# Altium footprint library ubloxLib.PcbLib: 65 footprints (part 1 of 5)
Each footprint in its own frame and in the unit in brackets; x right, y up, seen from the top. Pads: shape width x height; smd on the part's side, far side on the other; paste and mask are expansions set on the pad; w line width, h text height; cw(c..) or ccw(c..) is an arc to the next point about the centre after c.
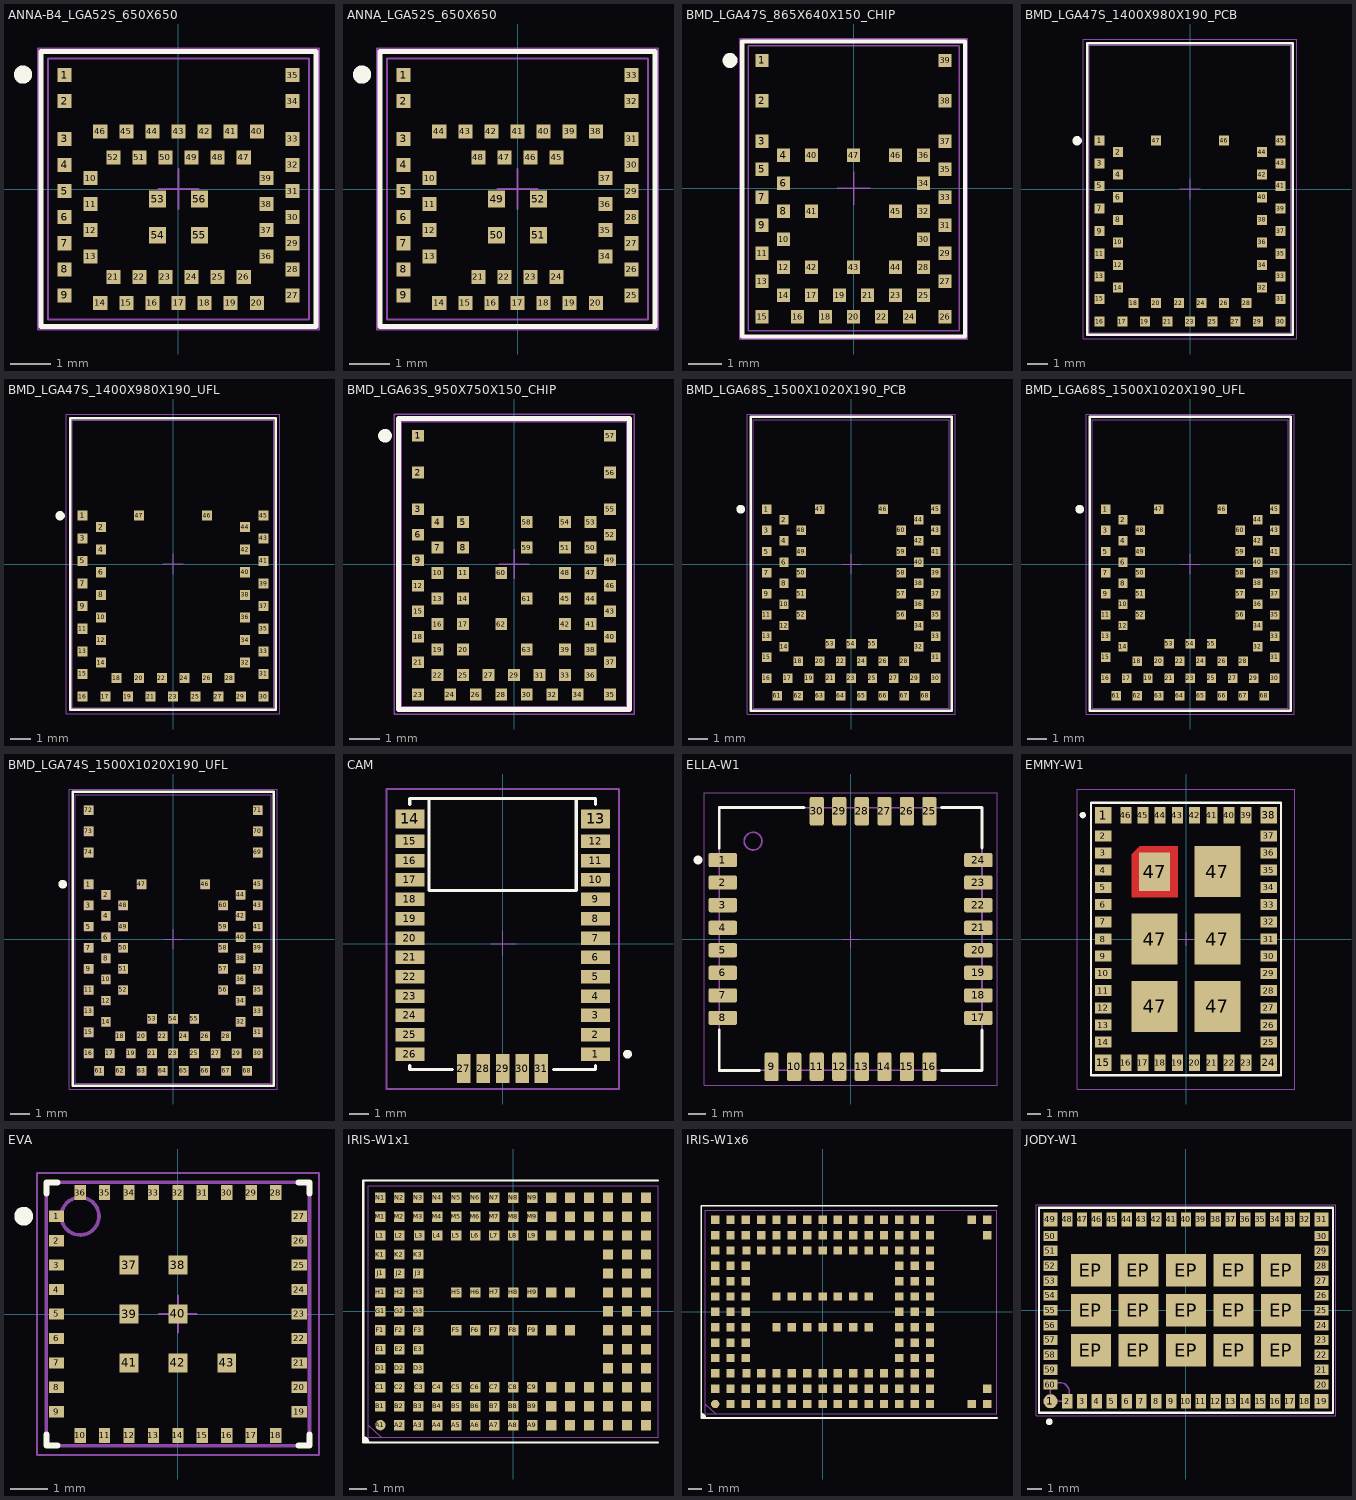
[diagram p0: the footprints below, top view; thin cyan lines are the x and y axes]

## ANNA-B4_LGA52S_650X650 [mm]
pads (56):
  rect 0.35x0.35 smd paste+0 mask+0.05: 1(-2.839,2.841) 2(-2.839,2.191) 3(-2.839,1.249) 4(-2.839,0.599) 5(-2.839,-0.051) 6(-2.839,-0.701) 7(-2.839,-1.351) 8(-2.839,-2.001) 9(-2.839,-2.651) 10(-2.189,0.274) 11(-2.189,-0.376) 12(-2.189,-1.026) 13(-2.189,-1.676) 14(-1.949,-2.839) 15(-1.299,-2.839) 17(0.001,-2.839) 18(0.651,-2.839) 20(1.951,-2.839) 21(-1.624,-2.189) 22(-0.974,-2.189) 24(0.326,-2.189) 25(0.976,-2.189) 26(1.626,-2.189) 27(2.841,-2.651) 28(2.841,-2.001) 29(2.841,-1.351) 30(2.841,-0.701) 31(2.841,-0.051) 32(2.841,0.599) 33(2.841,1.249) 34(2.841,2.191) 35(2.841,2.841) 36(2.191,-1.676) 37(2.191,-1.026) 38(2.191,-0.376) 39(2.191,0.274) 40(1.951,1.436) 41(1.301,1.436) 42(0.651,1.436) 43(0.001,1.436) 44(-0.649,1.436) 45(-1.299,1.436) 46(-1.949,1.436) 47(1.626,0.786) 49(0.326,0.786) 51(-0.974,0.786) 52(-1.624,0.786)
  rect 0.35x0.35 smd mask+0.05: 16(-0.649,-2.839) 19(1.301,-2.839) 23(-0.324,-2.189) 48(0.976,0.786) 50(-0.324,0.786)
  rect 0.42x0.42 smd paste+0 mask+0.05: 53(-0.519,-0.251) 54(-0.519,-1.151) 55(0.521,-1.151) 56(0.521,-0.251)
Top Overlay:
  circle w0.254: c-3.874,2.851 r0.1
  lines w0.127: -3.424,-3.424 -3.424,3.426 3.426,3.426 3.426,-3.424 -2.824,-3.424 -3.424,-3.424
Mechanical 13:
  lines w0.05: -3.249,-3.249 3.251,-3.249 3.251,3.251 -3.249,3.251 -3.249,-3.249
Mechanical 15:
  lines w0.05: -0.499,0.001 0.501,0.001 ; 0.001,-0.499 0.001,0.501 ; -3.499,-3.499 -3.499,3.501 3.501,3.501 3.501,-3.499 -3.499,-3.499
  text ".Designator" at 0.101,0.434 h1
3D body "ANNA-B4.step": height 1.15, standoff 0, extent -3.249,-3.249 3.251,3.251

## ANNA_LGA52S_650X650 [mm]
pads (52):
  rect 0.35x0.35 smd paste+0 mask+0.05: 1(-2.84,2.84) 2(-2.84,2.19) 3(-2.84,1.248) 4(-2.84,0.598) 5(-2.84,-0.052) 6(-2.84,-0.702) 7(-2.84,-1.352) 8(-2.84,-2.002) 9(-2.84,-2.652) 10(-2.19,0.273) 11(-2.19,-0.377) 12(-2.19,-1.027) 13(-2.19,-1.677) 14(-1.95,-2.84) 15(-1.3,-2.84) 17(0,-2.84) 18(0.65,-2.84) 20(1.95,-2.84) 21(-0.975,-2.19) 23(0.325,-2.19) 24(0.975,-2.19) 25(2.84,-2.652) 26(2.84,-2.002) 27(2.84,-1.352) 28(2.84,-0.702) 29(2.84,-0.052) 30(2.84,0.598) 31(2.84,1.248) 32(2.84,2.19) 33(2.84,2.84) 34(2.19,-1.677) 35(2.19,-1.027) 36(2.19,-0.377) 37(2.19,0.273) 38(1.95,1.435) 39(1.3,1.435) 40(0.65,1.435) 41(0,1.435) 42(-0.65,1.435) 43(-1.3,1.435) 44(-1.95,1.435) 46(0.325,0.785) 48(-0.975,0.785)
  rect 0.35x0.35 smd mask+0.05: 16(-0.65,-2.84) 19(1.3,-2.84) 22(-0.325,-2.19) 45(0.975,0.785) 47(-0.325,0.785)
  rect 0.42x0.42 smd paste+0 mask+0.05: 49(-0.52,-0.252) 50(-0.52,-1.152) 51(0.52,-1.152) 52(0.52,-0.252)
Top Overlay:
  circle w0.254: c-3.875,2.85 r0.1
  lines w0.127: -3.425,-3.425 -2.825,-3.425 3.425,-3.425 3.425,3.425 -3.425,3.425 -3.425,-3.425
Mechanical 13:
  lines w0.05: -3.25,-3.25 -3.25,3.25 3.25,3.25 3.25,-3.25 -3.25,-3.25
Mechanical 15:
  lines w0.05: -0.5,0 0.5,0 ; 0,-0.5 0,0.5 ; -3.5,-3.5 3.5,-3.5 3.5,3.5 -3.5,3.5 -3.5,-3.5
  text ".Designator" at 0.1,0.433 h1
3D body "u-blox_ANNA-B1-LGA52 (STEP-AP214)_1.0.step": height 1.2, standoff 0.05, extent -3.25,-3.25 3.25,3.25

## BMD_LGA47S_865X640X150_CHIP [mm] "LGA, 47pin, 0.8mm Pitch, 8.65mm x 6.4mm"
height 1.5
pads (47):
  rect 0.4x0.4 smd: 1(-2.775,3.875) 2(-2.775,2.65) 3(-2.775,1.425) 4(-2.125,1) 5(-2.775,0.575) 6(-2.125,0.15) 7(-2.775,-0.275) 8(-2.125,-0.7) 9(-2.775,-1.125) 10(-2.125,-1.55) 11(-2.775,-1.975) 12(-2.125,-2.4) 13(-2.775,-2.825) 14(-2.125,-3.25) 15(-2.775,-3.9) 16(-1.7,-3.9) 17(-1.275,-3.25) 18(-0.85,-3.9) 19(-0.425,-3.25) 20(0,-3.9) 21(0.425,-3.25) 22(0.85,-3.9) 23(1.275,-3.25) 24(1.7,-3.9) 25(2.125,-3.25) 26(2.775,-3.9) 27(2.775,-2.825) 28(2.125,-2.4) 29(2.775,-1.975) 30(2.125,-1.55) 31(2.775,-1.125) 32(2.125,-0.7) 33(2.775,-0.275) 34(2.125,0.15) 35(2.775,0.575) 36(2.125,1) 37(2.775,1.425) 38(2.775,2.65) 39(2.775,3.875) 40(-1.275,1) 41(-1.275,-0.7) 42(-1.275,-2.4) 43(0,-2.4) 44(1.275,-2.4) 45(1.275,-0.7) 46(1.275,1) 47(0,1)
Top Overlay:
  circle w0.254: c-3.75,3.875 r0.1
  lines w0.127: -3.375,-4.5 3.375,-4.5 3.375,4.45 -3.375,4.45 -3.375,-4.5
Mechanical 13:
  lines w0.05: -3.2,-4.325 3.2,-4.325 3.2,4.325 -3.2,4.325 -3.2,-4.325
Mechanical 15:
  lines w0.05: -0.5,0 0.5,0 ; 0,-0.5 0,0.5 ; -3.45,-4.575 3.45,-4.575 3.45,4.525 -3.45,4.525 -3.45,-4.575
  text ".Designator" at 0.1,0.433 h1
Multi-Layer:
  pour cut-out: -3.2,4.325 -3.2,4.075 -2.575,4.075 -2.575,1.2 2.425,1.2 2.425,4.075 3.2,4.075 3.2,4.325
3D body "BMD-350.STEP": height 1.54, standoff 0.05, extent -3.2,-4.325 3.2,4.325

## BMD_LGA47S_1400X980X190_PCB [mm] "LGA, 47pin, 1.1mm Pitch, 14mm x 9.8mm"
height 1.9
pads (47):
  rect 0.49x0.49 smd: 1(-4.4,2.35) 2(-3.5,1.8) 3(-4.4,1.25) 4(-3.5,0.7) 5(-4.4,0.15) 6(-3.5,-0.4) 7(-4.4,-0.95) 8(-3.5,-1.5) 9(-4.4,-2.05) 10(-3.5,-2.6) 11(-4.4,-3.15) 12(-3.5,-3.7) 13(-4.4,-4.25) 14(-3.5,-4.8) 15(-4.4,-5.35) 16(-4.4,-6.45) 17(-3.3,-6.45) 18(-2.75,-5.55) 19(-2.2,-6.45) 20(-1.65,-5.55) 21(-1.1,-6.45) 22(-0.55,-5.55) 23(0,-6.45) 24(0.55,-5.55) 25(1.1,-6.45) 26(1.65,-5.55) 27(2.2,-6.45) 28(2.75,-5.55) 29(3.3,-6.45) 30(4.4,-6.45) 31(4.4,-5.35) 32(3.5,-4.8) 33(4.4,-4.25) 34(3.5,-3.7) 35(4.4,-3.15) 36(3.5,-2.6) 37(4.4,-2.05) 38(3.5,-1.5) 39(4.4,-0.95) 40(3.5,-0.4) 41(4.4,0.15) 42(3.5,0.7) 43(4.4,1.25) 44(3.5,1.8) 45(4.4,2.35) 46(1.65,2.35) 47(-1.65,2.35)
Top Overlay:
  circle w0.254: c-5.5,2.35 r0.1
  lines w0.127: -5,-7.1 -5,7.1 5,7.1 5,-7.1 -5,-7.1
Mechanical 13:
  lines w0.05: -4.9,-7 -4.9,7 4.9,7 4.9,-7 -4.9,-7
Mechanical 15:
  lines w0.05: -0.5,0 0.5,0 ; 0,-0.5 0,0.5 ; -5.2,-7.3 -5.2,7.3 5.2,7.3 5.2,-7.3 -5.2,-7.3
  text ".Designator" at 0.1,0.433 h1
Multi-Layer:
  pour cut-out: -4.9,2.6 4.9,2.6 4.9,7 -4.9,7
3D body "BMD-300-330-360.STEP": height 1.86, standoff 0.05, extent -4.9,-7 4.9,7

## BMD_LGA47S_1400X980X190_UFL [mm] "LGA, 47pin, 1.1mm Pitch, 14mm x 9.8mm"
height 1.9
pads (47):
  rect 0.49x0.49 smd: 1(-4.4,2.35) 2(-3.5,1.8) 3(-4.4,1.25) 4(-3.5,0.7) 5(-4.4,0.15) 6(-3.5,-0.4) 7(-4.4,-0.95) 8(-3.5,-1.5) 9(-4.4,-2.05) 10(-3.5,-2.6) 11(-4.4,-3.15) 12(-3.5,-3.7) 13(-4.4,-4.25) 14(-3.5,-4.8) 15(-4.4,-5.35) 16(-4.4,-6.45) 17(-3.3,-6.45) 18(-2.75,-5.55) 19(-2.2,-6.45) 20(-1.65,-5.55) 21(-1.1,-6.45) 22(-0.55,-5.55) 23(0,-6.45) 24(0.55,-5.55) 25(1.1,-6.45) 26(1.65,-5.55) 27(2.2,-6.45) 28(2.75,-5.55) 29(3.3,-6.45) 30(4.4,-6.45) 31(4.4,-5.35) 32(3.5,-4.8) 33(4.4,-4.25) 34(3.5,-3.7) 35(4.4,-3.15) 36(3.5,-2.6) 37(4.4,-2.05) 38(3.5,-1.5) 39(4.4,-0.95) 40(3.5,-0.4) 41(4.4,0.15) 42(3.5,0.7) 43(4.4,1.25) 44(3.5,1.8) 45(4.4,2.35) 46(1.65,2.35) 47(-1.65,2.35)
Top Overlay:
  circle w0.254: c-5.5,2.35 r0.1
  lines w0.127: -5,-7.1 5,-7.1 5,7.1 -5,7.1 -5,-7.1
Mechanical 13:
  lines w0.05: -4.9,-7 4.9,-7 4.9,7 -4.9,7 -4.9,-7
Mechanical 15:
  lines w0.05: -0.5,0 0.5,0 ; 0,-0.5 0,0.5 ; -5.2,-7.3 5.2,-7.3 5.2,7.3 -5.2,7.3 -5.2,-7.3
  text ".Designator" at 0.1,0.433 h1
Multi-Layer:
  pour cut-out: -4.9,2.6 4.9,2.6 4.9,7 -4.9,7
3D body "BMD-301.STEP": height 1.89, standoff 0.05, extent -4.9,-7 4.9,7

## BMD_LGA63S_950X750X150_CHIP [mm] "WLCSP, 63pin, 0.85mm Pitch, 9.5mm x 7.5mm"
height 1.5
pads (63):
  rect 0.39x0.39 smd: 1(-3.2,4.275) 2(-3.2,3.05) 3(-3.2,1.825) 4(-2.55,1.4) 5(-1.7,1.4) 6(-3.2,0.975) 7(-2.55,0.55) 8(-1.7,0.55) 9(-3.2,0.125) 10(-2.55,-0.3) 11(-1.7,-0.3) 12(-3.2,-0.725) 13(-2.55,-1.15) 14(-1.7,-1.15) 15(-3.2,-1.575) 16(-2.55,-2) 17(-1.7,-2) 18(-3.2,-2.425) 19(-2.55,-2.85) 20(-1.7,-2.85) 21(-3.2,-3.275) 22(-2.55,-3.7) 23(-3.2,-4.35) 24(-2.125,-4.35) 25(-1.7,-3.7) 26(-1.275,-4.35) 27(-0.85,-3.7) 28(-0.425,-4.35) 29(0,-3.7) 30(0.425,-4.35) 31(0.85,-3.7) 32(1.275,-4.35) 33(1.7,-3.7) 34(2.125,-4.35) 35(3.2,-4.35) 36(2.55,-3.7) 37(3.2,-3.275) 38(2.55,-2.85) 39(1.7,-2.85) 40(3.2,-2.425) 41(2.55,-2) 42(1.7,-2) 43(3.2,-1.575) 44(2.55,-1.15) 45(1.7,-1.15) 46(3.2,-0.725) 47(2.55,-0.3) 48(1.7,-0.3) 49(3.2,0.125) 50(2.55,0.55) 51(1.7,0.55) 52(3.2,0.975) 53(2.55,1.4) 54(1.7,1.4) 55(3.2,1.825) 56(3.2,3.05) 57(3.2,4.275) 58(0.425,1.4) 59(0.425,0.55) 60(-0.425,-0.3) 61(0.425,-1.15) 62(-0.425,-2) 63(0.425,-2.85)
Top Overlay:
  circle w0.254: c-4.3,4.275 r0.1
  lines w0.152: -3.85,-4.85 3.85,-4.85 3.85,4.85 -3.85,4.85 -3.85,-4.85
Mechanical 13:
  lines w0.05: -3.75,-4.75 -3.75,4.75 3.75,4.75 3.75,-4.75 -3.75,-4.75
Mechanical 15:
  lines w0.05: -0.5,0 0.5,0 ; 0,-0.5 0,0.5 ; -4,-5 -4,5 4,5 4,-5 -4,-5
  text ".Designator" at 0.1,0.433 h1
Multi-Layer:
  pour cut-out: -3.75,4.75 -3.75,4.55 -2.36,4.55 -2.36,1.65 2.79,1.65 2.79,4.55 3.75,4.55 3.75,4.75
3D body "BMD-380.STEP": height 1.53, standoff 0.05, extent -3.75,-4.75 3.75,4.75

## BMD_LGA68S_1500X1020X190_PCB [mm] "LGA, 68pin, 1.1mm Pitch, 15mm x 10.2mm"
height 1.9
pads (68):
  rect 0.49x0.49 smd: 1(-4.4,2.85) 2(-3.5,2.3) 3(-4.4,1.75) 4(-3.5,1.2) 5(-4.4,0.65) 6(-3.5,0.1) 7(-4.4,-0.45) 8(-3.5,-1) 9(-4.4,-1.55) 10(-3.5,-2.1) 11(-4.4,-2.65) 12(-3.5,-3.2) 13(-4.4,-3.75) 14(-3.5,-4.3) 15(-4.4,-4.85) 16(-4.4,-5.95) 17(-3.3,-5.95) 18(-2.75,-5.05) 19(-2.2,-5.95) 20(-1.65,-5.05) 21(-1.1,-5.95) 22(-0.55,-5.05) 23(0,-5.95) 24(0.55,-5.05) 25(1.1,-5.95) 26(1.65,-5.05) 27(2.2,-5.95) 28(2.75,-5.05) 29(3.3,-5.95) 30(4.4,-5.95) 31(4.4,-4.85) 32(3.5,-4.3) 33(4.4,-3.75) 34(3.5,-3.2) 35(4.4,-2.65) 36(3.5,-2.1) 37(4.4,-1.55) 38(3.5,-1) 39(4.4,-0.45) 40(3.5,0.1) 41(4.4,0.65) 42(3.5,1.2) 43(4.4,1.75) 44(3.5,2.3) 45(4.4,2.85) 46(1.65,2.85) 47(-1.65,2.85) 48(-2.6,1.75) 49(-2.6,0.65) 50(-2.6,-0.45) 51(-2.6,-1.55) 52(-2.6,-2.65) 53(-1.1,-4.15) 54(0,-4.15) 55(1.1,-4.15) 56(2.6,-2.65) 57(2.6,-1.55) 58(2.6,-0.45) 59(2.6,0.65) 60(2.6,1.75) 61(-3.85,-6.85) 62(-2.75,-6.85) 63(-1.65,-6.85) 64(-0.55,-6.85) 65(0.55,-6.85) 66(1.65,-6.85) 67(2.75,-6.85) 68(3.85,-6.85)
Top Overlay:
  circle w0.254: c-5.75,2.85 r0.1
  lines w0.127: -5.225,-7.625 5.225,-7.625 5.225,7.65 -5.225,7.65 -5.225,-7.625
Mechanical 13:
  lines w0.05: -5.1,-7.5 5.1,-7.5 5.1,7.5 -5.1,7.5 -5.1,-7.5
Mechanical 15:
  lines w0.05: -0.5,0 0.5,0 ; 0,-0.5 0,0.5 ; -5.4,-7.8 -5.4,7.8 5.4,7.8 5.4,-7.8 -5.4,-7.8
  text ".Designator" at 0.1,0.433 h1
Multi-Layer:
  pour cut-out: -5.1,3.1 5.1,3.1 5.1,7.5 -5.1,7.5
3D body "BMD-340.STEP": height 1.87, standoff 0.05, extent -5.1,-7.5 5.1,7.5

## BMD_LGA68S_1500X1020X190_UFL [mm] "LGA, 68pin, 1.1mm Pitch, 15mm x 10.2mm"
height 1.9
pads (68):
  rect 0.49x0.49 smd: 1(-4.4,2.85) 2(-3.5,2.3) 3(-4.4,1.75) 4(-3.5,1.2) 5(-4.4,0.65) 6(-3.5,0.1) 7(-4.4,-0.45) 8(-3.5,-1) 9(-4.4,-1.55) 10(-3.5,-2.1) 11(-4.4,-2.65) 12(-3.5,-3.2) 13(-4.4,-3.75) 14(-3.5,-4.3) 15(-4.4,-4.85) 16(-4.4,-5.95) 17(-3.3,-5.95) 18(-2.75,-5.05) 19(-2.2,-5.95) 20(-1.65,-5.05) 21(-1.1,-5.95) 22(-0.55,-5.05) 23(0,-5.95) 24(0.55,-5.05) 25(1.1,-5.95) 26(1.65,-5.05) 27(2.2,-5.95) 28(2.75,-5.05) 29(3.3,-5.95) 30(4.4,-5.95) 31(4.4,-4.85) 32(3.5,-4.3) 33(4.4,-3.75) 34(3.5,-3.2) 35(4.4,-2.65) 36(3.5,-2.1) 37(4.4,-1.55) 38(3.5,-1) 39(4.4,-0.45) 40(3.5,0.1) 41(4.4,0.65) 42(3.5,1.2) 43(4.4,1.75) 44(3.5,2.3) 45(4.4,2.85) 46(1.65,2.85) 47(-1.65,2.85) 48(-2.6,1.75) 49(-2.6,0.65) 50(-2.6,-0.45) 51(-2.6,-1.55) 52(-2.6,-2.65) 53(-1.1,-4.15) 54(0,-4.15) 55(1.1,-4.15) 56(2.6,-2.65) 57(2.6,-1.55) 58(2.6,-0.45) 59(2.6,0.65) 60(2.6,1.75) 61(-3.85,-6.85) 62(-2.75,-6.85) 63(-1.65,-6.85) 64(-0.55,-6.85) 65(0.55,-6.85) 66(1.65,-6.85) 67(2.75,-6.85) 68(3.85,-6.85)
Top Overlay:
  circle w0.254: c-5.75,2.85 r0.1
  lines w0.127: -5.225,-7.625 5.225,-7.625 5.225,7.65 -5.225,7.65 -5.225,-7.625
Mechanical 13:
  lines w0.05: -5.1,-7.5 5.1,-7.5 5.1,7.5 -5.1,7.5 -5.1,-7.5
Mechanical 15:
  lines w0.05: -0.5,0 0.5,0 ; 0,-0.5 0,0.5 ; -5.4,-7.8 -5.4,7.8 5.4,7.8 5.4,-7.8 -5.4,-7.8
  text ".Designator" at 0.1,0.433 h1
Multi-Layer:
  pour cut-out: -5.1,3.1 5.1,3.1 5.1,7.5 -5.1,7.5
3D body "BMD-341.STEP": height 1.87, standoff 0.05, extent -5.1,-7.5 5.1,7.5

## BMD_LGA74S_1500X1020X190_UFL [mm] "LGA, 68pin, 1.1mm Pitch, 15mm x 10.2mm"
height 1.9
pads (74):
  rect 0.49x0.49 smd: 1(-4.4,2.85) 2(-3.5,2.3) 3(-4.4,1.75) 4(-3.5,1.2) 5(-4.4,0.65) 6(-3.5,0.1) 7(-4.4,-0.45) 8(-3.5,-1) 9(-4.4,-1.55) 10(-3.5,-2.1) 11(-4.4,-2.65) 12(-3.5,-3.2) 13(-4.4,-3.75) 14(-3.5,-4.3) 15(-4.4,-4.85) 16(-4.4,-5.95) 17(-3.3,-5.95) 18(-2.75,-5.05) 19(-2.2,-5.95) 20(-1.65,-5.05) 21(-1.1,-5.95) 22(-0.55,-5.05) 23(0,-5.95) 24(0.55,-5.05) 25(1.1,-5.95) 26(1.65,-5.05) 27(2.2,-5.95) 28(2.75,-5.05) 29(3.3,-5.95) 30(4.4,-5.95) 31(4.4,-4.85) 32(3.5,-4.3) 33(4.4,-3.75) 34(3.5,-3.2) 35(4.4,-2.65) 36(3.5,-2.1) 37(4.4,-1.55) 38(3.5,-1) 39(4.4,-0.45) 40(3.5,0.1) 41(4.4,0.65) 42(3.5,1.2) 43(4.4,1.75) 44(3.5,2.3) 45(4.4,2.85) 46(1.65,2.85) 47(-1.65,2.85) 48(-2.6,1.75) 49(-2.6,0.65) 50(-2.6,-0.45) 51(-2.6,-1.55) 52(-2.6,-2.65) 53(-1.1,-4.15) 54(0,-4.15) 55(1.1,-4.15) 56(2.6,-2.65) 57(2.6,-1.55) 58(2.6,-0.45) 59(2.6,0.65) 60(2.6,1.75) 61(-3.85,-6.85) 62(-2.75,-6.85) 63(-1.65,-6.85) 64(-0.55,-6.85) 65(0.55,-6.85) 66(1.65,-6.85) 67(2.75,-6.85) 68(3.85,-6.85)
  rect 0.5x0.5 smd: 69(4.4,4.5) 70(4.4,5.6) 71(4.4,6.7) 72(-4.4,6.7) 73(-4.4,5.6) 74(-4.4,4.5)
Top Overlay:
  circle w0.254: c-5.75,2.85 r0.1
  lines w0.127: -5.225,-7.625 5.225,-7.625 5.225,7.65 -5.225,7.65 -5.225,-7.625
Mechanical 13:
  lines w0.05: -5.1,-7.5 5.1,-7.5 5.1,7.5 -5.1,7.5 -5.1,-7.5
Mechanical 14:
  drawing of 296 lines, arcs and shapes, not listed
Mechanical 15:
  lines w0.05: -0.5,0 0.5,0 ; 0,-0.5 0,0.5 ; -5.4,-7.8 5.4,-7.8 5.4,7.8 -5.4,7.8 -5.4,-7.8
  text ".Designator" at 0.1,0.433 h1
Multi-Layer:
  pour cut-out: -5.1,3.1 5.1,3.1 5.1,7.5 -5.1,7.5
3D body "BMD-345.STEP": height 2.03, standoff 0.05, extent -5.1,-7.5 5.1,7.5

## CAM [mm] "u-blox CAM GNSS antenna module"
pads (31):
  rect 1.5x0.7 smd: 1(4.8,-5.7) 2(4.8,-4.7) 3(4.8,-3.7) 4(4.8,-2.7) 5(4.8,-1.7) 6(4.8,-0.7) 7(4.8,0.3) 8(4.8,1.3) 9(4.8,2.3) 10(4.8,3.3) 11(4.8,4.3) 12(4.8,5.3) 15(-4.8,5.3) 16(-4.8,4.3) 17(-4.8,3.3) 18(-4.8,2.3) 19(-4.8,1.3) 20(-4.8,0.3) 21(-4.8,-0.7) 22(-4.8,-1.7) 23(-4.8,-2.7) 24(-4.8,-3.7) 25(-4.8,-4.7) 26(-4.8,-5.7)
  rect 1.5x1 smd: 13(4.8,6.45) 14(-4.8,6.45)
  rect 0.7x1.5 smd: 27(-2,-6.45) 28(-1,-6.45) 29(0,-6.45) 30(1,-6.45) 31(2,-6.45)
Top Overlay:
  circle w0.254: c6.45,-5.7 r0.1
  lines w0.16: -4.8,-6.3 -4.8,-6.5 -2.6,-6.5 ; -4.8,7.2 -4.8,7.5 4.8,7.5 4.8,7.2 ; -3.8,7.5 -3.8,2.75 3.8,2.75 3.8,7.5 ; 2.63,-6.5 4.45,-6.5 4.8,-6.5 4.8,-6.3
Mechanical 15:
  lines w0.05: -0.619,-0.003 -0.001,-0.003 ; -0.001,-0.615 -0.001,-0.003 ; -0.001,0.662 -0.001,-0.003 ; 0.696,-0.003 -0.001,-0.003
  lines w0.1: -6,-7.5 6,-7.5 6,8 -6,8 -6,-7.5
  text ".Designator" at 0.099,0.43 h1
Multi-Layer:
  pour cut-out: -3.8,7.5 -3.8,2.75 3.8,2.75 3.8,7.5
3D body "CAM (STEP-AP214).STEP": height 1.97, standoff -0.04, extent -4.8,-6.5 4.8,7.5

## ELLA-W1 [mm] "IEEE 802.11a/b/g/n Wi-Fi, Bluetooth 3.0+HS Module"
height 2
pads (30):
  rrect25% 1.6x0.8 smd: 1(-7.2,4.445) 2(-7.2,3.175) 3(-7.2,1.905) 4(-7.2,0.635) 5(-7.2,-0.635) 6(-7.2,-1.905) 7(-7.2,-3.175) 8(-7.2,-4.445) 17(7.2,-4.445) 18(7.2,-3.175) 19(7.2,-1.905) 20(7.2,-0.635) 21(7.2,0.635) 22(7.2,1.905) 23(7.2,3.175) 24(7.2,4.445)
  rrect25% 0.8x1.6 smd: 9(-4.445,-7.2) 10(-3.175,-7.2) 11(-1.905,-7.2) 12(-0.635,-7.2) 13(0.635,-7.2) 14(1.905,-7.2) 15(3.175,-7.2) 16(4.445,-7.2) 25(4.445,7.2) 26(3.175,7.2) 27(1.905,7.2) 28(0.635,7.2) 29(-0.635,7.2) 30(-1.905,7.2)
Top Overlay:
  circle w0.4: c-8.6,4.45 r0.05
  lines w0.16: -7.4,-5.125 -7.4,-7.4 -5.125,-7.4 ; -7.4,5.125 -7.4,7.4 -2.625,7.4 ; 5.125,-7.4 7.4,-7.4 7.4,-5.125 ; 5.125,7.4 7.4,7.4 7.4,5.125
Mechanical 13:
  circle w0.1: c-5.489,5.512 r0.499
  lines w0.1: -7.4,4.695 -7.4,7.4 -2.155,7.4 ccw(c-1.905,7.4) -1.655,7.4 -0.885,7.4 ccw(c-0.635,7.4) -0.385,7.4 0.385,7.4 ccw(c0.635,7.4) 0.885,7.4 1.655,7.4 ccw(c1.905,7.4) 2.155,7.4 2.925,7.4 ccw(c3.175,7.4) 3.425,7.4 4.195,7.4 ccw(c4.445,7.4) 4.695,7.4 ; -7.4,4.695 cw(c-7.4,4.445) -7.4,4.195 -7.4,3.425 cw(c-7.4,3.175) -7.4,2.925 -7.4,2.155 cw(c-7.4,1.905) -7.4,1.655 -7.4,0.885 cw(c-7.4,0.635) -7.4,0.385 -7.4,-0.385 cw(c-7.4,-0.635) -7.4,-0.885 -7.4,-1.655 cw(c-7.4,-1.905) -7.4,-2.155 -7.4,-2.925 cw(c-7.4,-3.175) -7.4,-3.425 -7.4,-4.195 cw(c-7.4,-4.445) -7.4,-4.695 -7.4,-7.4 -4.695,-7.4 cw(c-4.445,-7.4) -4.195,-7.4 -3.425,-7.4 cw(c-3.175,-7.4) -2.925,-7.4 -2.155,-7.4 cw(c-1.905,-7.4) -1.655,-7.4 -0.885,-7.4 cw(c-0.635,-7.4) -0.385,-7.4 0.385,-7.4 cw(c0.635,-7.4) 0.885,-7.4 1.655,-7.4 cw(c1.905,-7.4) 2.155,-7.4 2.925,-7.4 cw(c3.175,-7.4) 3.425,-7.4 4.195,-7.4 cw(c4.445,-7.4) 4.695,-7.4 7.4,-7.4 7.4,-4.695 ; 4.694,7.4 7.4,7.4 7.4,4.695 ccw(c7.4,4.445) 7.4,4.195 7.4,3.425 ccw(c7.4,3.175) 7.4,2.925 7.4,2.155 ccw(c7.4,1.905) 7.4,1.655 7.4,0.885 ccw(c7.4,0.635) 7.4,0.385 7.4,-0.385 ccw(c7.4,-0.635) 7.4,-0.885 7.4,-1.655 ccw(c7.4,-1.905) 7.4,-2.155 7.4,-2.925 ccw(c7.4,-3.175) 7.4,-3.425 7.4,-4.195 ccw(c7.4,-4.445) 7.4,-4.695
Mechanical 15:
  lines w0.05: -0.5,0 0.5,0 ; 0,-0.5 0,0.5 ; -8.25,-8.25 8.25,-8.25 8.25,8.25 -8.25,8.25 -8.25,-8.25
  text ".Designator" at 0.1,0.433 h1
3D body: height 0.87, standoff 0, extent 4.17,7.125 4.72,7.4
3D body: height 0.87, standoff 0.85, extent 4.02,6.975 4.87,7.4
3D body: height 0.87, standoff 0, extent 2.9,7.125 3.45,7.4
3D body: height 0.87, standoff 0.85, extent 2.75,6.975 3.6,7.4
3D body: height 0.87, standoff 0, extent 1.63,7.125 2.18,7.4
3D body: height 0.87, standoff 0.85, extent 1.48,6.975 2.33,7.4
3D body: height 0.87, standoff 0, extent 0.36,7.125 0.91,7.4
3D body: height 0.87, standoff 0.85, extent 0.21,6.975 1.06,7.4
3D body: height 0.87, standoff 0, extent -0.91,7.125 -0.36,7.4
3D body: height 0.87, standoff 0.85, extent -1.06,6.975 -0.21,7.4
3D body: height 0.87, standoff 0, extent -2.18,7.125 -1.63,7.4
3D body: height 0.87, standoff 0.85, extent -2.33,6.975 -1.48,7.4
3D body: height 0.87, standoff 0, extent 7.125,-4.72 7.4,-4.17
3D body: height 0.87, standoff 0.85, extent 6.975,-4.87 7.4,-4.02
3D body: height 0.87, standoff 0, extent 7.125,-3.45 7.4,-2.9
3D body: height 0.87, standoff 0.85, extent 6.975,-3.6 7.4,-2.75
3D body: height 0.87, standoff 0, extent 7.125,-2.18 7.4,-1.63
3D body: height 0.87, standoff 0.85, extent 6.975,-2.33 7.4,-1.48
3D body: height 0.87, standoff 0, extent 7.125,-0.91 7.4,-0.36
3D body: height 0.87, standoff 0.85, extent 6.975,-1.06 7.4,-0.21
3D body: height 0.87, standoff 0, extent 7.125,0.36 7.4,0.91
3D body: height 0.87, standoff 0.85, extent 6.975,0.21 7.4,1.06
3D body: height 0.87, standoff 0, extent 7.125,1.63 7.4,2.18
3D body: height 0.87, standoff 0.85, extent 6.975,1.48 7.4,2.33
3D body: height 0.87, standoff 0, extent 7.125,2.9 7.4,3.45
3D body: height 0.87, standoff 0.85, extent 6.975,2.75 7.4,3.6
3D body: height 0.87, standoff 0, extent 7.125,4.17 7.4,4.72
3D body: height 0.87, standoff 0.85, extent 6.975,4.02 7.4,4.87
3D body: height 0.87, standoff 0, extent -4.72,-7.4 -4.17,-7.125
3D body: height 0.87, standoff 0.85, extent -4.87,-7.4 -4.02,-6.975
3D body: height 0.87, standoff 0, extent -3.45,-7.4 -2.9,-7.125
3D body: height 0.87, standoff 0.85, extent -3.6,-7.4 -2.75,-6.975
3D body: height 0.87, standoff 0, extent -2.18,-7.4 -1.63,-7.125
3D body: height 0.87, standoff 0.85, extent -2.33,-7.4 -1.48,-6.975
3D body: height 0.87, standoff 0, extent -0.91,-7.4 -0.36,-7.125
3D body: height 0.87, standoff 0.85, extent -1.06,-7.4 -0.21,-6.975
3D body: height 0.87, standoff 0, extent 0.36,-7.4 0.91,-7.125
3D body: height 0.87, standoff 0.85, extent 0.21,-7.4 1.06,-6.975
3D body: height 0.87, standoff 0, extent 1.63,-7.4 2.18,-7.125
3D body: height 0.87, standoff 0.85, extent 1.48,-7.4 2.33,-6.975
3D body: height 0.87, standoff 0, extent 2.9,-7.4 3.45,-7.125
3D body: height 0.87, standoff 0.85, extent 2.75,-7.4 3.6,-6.975
3D body: height 0.87, standoff 0, extent 4.17,-7.4 4.72,-7.125
3D body: height 0.87, standoff 0.85, extent 4.02,-7.4 4.87,-6.975
3D body: height 0.87, standoff 0.85, extent -7.4,-4.87 -6.975,-4.02
3D body: height 0.87, standoff 0, extent -7.4,-4.72 -7.125,-4.17
3D body: height 0.87, standoff 0.85, extent -7.4,-3.6 -6.975,-2.75
3D body: height 0.87, standoff 0, extent -7.4,-3.45 -7.125,-2.9
3D body: height 0.87, standoff 0.85, extent -7.4,-2.33 -6.975,-1.48
3D body: height 0.87, standoff 0, extent -7.4,-2.18 -7.125,-1.63
3D body: height 0.87, standoff 0.85, extent -7.4,-1.06 -6.975,-0.21
3D body: height 0.87, standoff 0, extent -7.4,-0.91 -7.125,-0.36
3D body: height 0.87, standoff 0.85, extent -7.4,0.21 -6.975,1.06
3D body: height 0.87, standoff 0, extent -7.4,0.36 -7.125,0.91
3D body: height 0.87, standoff 0.85, extent -7.4,1.48 -6.975,2.33
3D body: height 0.87, standoff 0, extent -7.4,1.63 -7.125,2.18
3D body: height 0.87, standoff 0.85, extent -7.4,2.75 -6.975,3.6
3D body: height 0.87, standoff 0, extent -7.4,2.9 -7.125,3.45
3D body: height 0.87, standoff 0.85, extent -7.4,4.02 -6.975,4.87
3D body: height 0.87, standoff 0, extent -7.4,4.17 -7.125,4.72
3D body: height 0.85, standoff 0, extent -7.4,-7.4 7.4,7.4
3D body: height 2.35, standoff 1.1, extent 7.049,-6.15 7.199,6.15
3D body: height 2.35, standoff 1.1, extent -7.2,-6.15 -7.05,6.15
3D body: height 2.35, standoff 1.1, extent -6.15,-7.2 6.15,-7.05
3D body: height 0.87, standoff 0.85, extent -7.3,-7.3 -6.1,-6.1
3D body: height 2.35, standoff 0.87, extent -7.1,-7.1 -6.2,-6.2
3D body: height 0.87, standoff 0.85, extent 6.1,-7.3 7.3,-6.1
3D body: height 2.35, standoff 0.87, extent 6.2,-7.1 7.1,-6.2
3D body: height 0.87, standoff 0.85, extent 6.099,6.1 7.299,7.3
3D body: height 2.35, standoff 0.87, extent 6.199,6.2 7.099,7.1
3D body: height 2.35, standoff 1.1, extent -6.15,7.05 6.15,7.2
3D body: height 2.35, standoff 0.87, extent -7.1,6.2 -6.2,7.1
3D body: height 0.87, standoff 0.85, extent -7.3,6.1 -6.1,7.3
3D body: height 2.51, standoff 2.5, extent -5.999,5.01 -5.001,6.009
3D body: height 2.5, standoff 2.35, extent -7.2,-7.2 7.199,7.2

## EMMY-W1 [mm] "Host-based multiradio module with Wi-Fi, Bluetooth and NFC"
height 2.5
pads (52):
  rect 1.2x1.2 smd: 1(-6,9) 15(-6,-9) 24(6,-9) 38(6,9)
  rect 1.2x0.8 smd: 2(-6,7.5) 3(-6,6.25) 4(-6,5) 5(-6,3.75) 6(-6,2.5) 7(-6,1.25) 8(-6,0) 9(-6,-1.25) 10(-6,-2.5) 11(-6,-3.75) 12(-6,-5) 13(-6,-6.25) 14(-6,-7.5) 25(6,-7.5) 26(6,-6.25) 27(6,-5) 28(6,-3.75) 29(6,-2.5) 30(6,-1.25) 31(6,0) 32(6,1.25) 33(6,2.5) 34(6,3.75) 35(6,5) 36(6,6.25) 37(6,7.5)
  rect 0.8x1.2 smd: 16(-4.375,-9) 17(-3.125,-9) 18(-1.875,-9) 19(-0.625,-9) 20(0.625,-9) 21(1.875,-9) 22(3.125,-9) 23(4.375,-9) 39(4.375,9) 40(3.125,9) 41(1.875,9) 42(0.625,9) 43(-0.625,9) 44(-1.875,9) 45(-3.125,9) 46(-4.375,9)
  rect 3.35x3.7 smd paste-10: 47(-2.275,-4.9) 47(-2.275,0) 47(2.275,-4.9) 47(2.275,0) 47(2.275,4.9)
  rect 2.25x2.8 smd paste-10: 47(-2.275,4.9)
Top Layer:
  region: -3.95,3.05 -0.6,3.05 -0.6,6.75 -3.35,6.75 -3.95,6.15
Top Overlay:
  circle w0.254: c-7.5,9 r0.1
  lines w0.15: -6.9,-9.9 6.9,-9.9 6.9,9.9 -6.9,9.9 -6.9,-9.9
Top Paste:
  drawing of 54 lines, arcs and shapes, not listed
Top Solder:
  region: -4.075,2.95 -0.5,2.95 -0.5,6.85 -3.425,6.85 -4.075,6.2
Mechanical 13:
  lines w0.1: -6.9,-9.9 6.9,-9.9 6.9,9.9 -6.9,9.9 -6.9,-9.9
Mechanical 15:
  lines w0.05: -0.5,0 0.5,0 ; 0,-0.5 0,0.5 ; -7.9,-10.9 7.9,-10.9 7.9,10.9 -7.9,10.9 -7.9,-10.9
  text ".Designator" at 0.1,0.433 h1
3D body: height 3, standoff 0, extent -6.925,-9.9 6.925,9.9

## EVA [mm] "u-blox EVA GNSS module"
height 1.16
pads (43):
  rect 0.4x0.3 smd: 1(-3.225,2.6) 2(-3.225,1.95) 3(-3.225,1.3) 4(-3.225,0.65) 5(-3.225,0) 6(-3.225,-0.65) 7(-3.225,-1.3) 8(-3.225,-1.95) 9(-3.225,-2.6) 19(3.225,-2.6) 20(3.225,-1.95) 21(3.225,-1.3) 22(3.225,-0.65) 23(3.225,0) 24(3.225,0.65) 25(3.225,1.3) 26(3.225,1.95) 27(3.225,2.6)
  rect 0.3x0.4 smd: 10(-2.6,-3.225) 11(-1.95,-3.225) 12(-1.3,-3.225) 13(-0.65,-3.225) 14(0,-3.225) 15(0.65,-3.225) 16(1.3,-3.225) 17(1.95,-3.225) 18(2.6,-3.225) 28(2.6,3.225) 29(1.95,3.225) 30(1.3,3.225) 31(0.65,3.225) 32(0,3.225) 33(-0.65,3.225) 34(-1.3,3.225) 35(-1.95,3.225) 36(-2.6,3.225)
  rect 0.5x0.5 smd paste+0: 37(-1.3,1.3) 38(0,1.3) 39(-1.3,0) 40(0,0) 41(-1.3,-1.3) 42(0,-1.3) 43(1.3,-1.3)
Top Overlay:
  circle w0.25: c-4.1,2.6 r0.125
  lines w0.16: -3.5,-3.2 -3.5,-3.5 -3.2,-3.5 ; -3.5,3.2 -3.5,3.5 -3.2,3.5 ; 3.2,-3.5 3.5,-3.5 3.5,-3.2 ; 3.2,3.5 3.5,3.5 3.5,3.2
Mechanical 13:
  circle w0.1: c-2.6,2.6 r0.5
  lines w0.1: -3.5,-3.5 3.5,-3.5 3.5,3.5 -3.5,3.5 -3.5,-3.5
Mechanical 15:
  lines w0.05: -0.5,0 0.5,0 ; 0,-0.5 0,0.5 ; -3.75,-3.75 3.75,-3.75 3.75,3.75 -3.75,3.75 -3.75,-3.75
  text ".Designator" at 0.1,0.433 h1
3D body "EVA-43 (STEP-AP214).STEP": height 1.07, standoff 0.01, extent -3.499,-3.499 3.501,3.501

## IRIS-W1x1 [mm] "IRIS LGA, 146pin ,1.1mm Pitch, 14.6mm x 16.8mm"
height 2.1
pads (146):
  round 0.6 smd: A1(-7.7,-6.6)
  rect 0.6x0.6 smd: A2(-6.6,-6.6) A3(-5.5,-6.6) A4(-4.4,-6.6) A5(-3.3,-6.6) A6(-2.2,-6.6) A7(-1.1,-6.6) A8(0,-6.6) A9(1.1,-6.6) A10(2.2,-6.6) A11(3.3,-6.6) A12(4.4,-6.6) A14(5.5,-6.6) A15(6.6,-6.6) A16(7.7,-6.6) B1(-7.7,-5.5) B2(-6.6,-5.5) B3(-5.5,-5.5) B4(-4.4,-5.5) B5(-3.3,-5.5) B6(-2.2,-5.5) B7(-1.1,-5.5) B8(0,-5.5) B9(1.1,-5.5) B10(2.2,-5.5) B11(3.3,-5.5) B12(4.4,-5.5) B14(5.5,-5.5) B15(6.6,-5.5) B16(7.7,-5.5) C1(-7.7,-4.4) C2(-6.6,-4.4) C3(-5.45,-4.4) C4(-4.4,-4.4) C5(-3.3,-4.4) C6(-2.2,-4.4) C7(-1.1,-4.4) C8(0,-4.4) C9(1.1,-4.4) C10(2.2,-4.4) C11(3.3,-4.4) C12(4.4,-4.4) C14(5.5,-4.4) C15(6.6,-4.4) C16(7.7,-4.4) D1(-7.7,-3.3) D2(-6.6,-3.3) D3(-5.5,-3.3) D14(5.5,-3.3) D15(6.6,-3.3) D16(7.7,-3.3) E1(-7.7,-2.2) E2(-6.6,-2.2) E3(-5.5,-2.2) E14(5.5,-2.2) E15(6.6,-2.2) E16(7.7,-2.2) F1(-7.7,-1.1) F2(-6.6,-1.1) F3(-5.5,-1.1) F5(-3.3,-1.1) F6(-2.2,-1.1) F7(-1.1,-1.1) F8(0,-1.1) F9(1.1,-1.1) F10(2.2,-1.1) F11(3.3,-1.1) F14(5.5,-1.1) F15(6.6,-1.1) F16(7.7,-1.1) G1(-7.7,0) G2(-6.6,0) G3(-5.5,0) G14(5.5,0) G15(6.6,0) G16(7.7,0) H1(-7.7,1.1) H2(-6.6,1.1) H3(-5.5,1.1) H5(-3.3,1.1) H6(-2.2,1.1) H7(-1.1,1.1) H8(0,1.1) H9(1.1,1.1) H10(2.2,1.1) H11(3.3,1.1) H14(5.5,1.1) H15(6.6,1.1) H16(7.7,1.1) J1(-7.7,2.2) J2(-6.6,2.2) J3(-5.5,2.2) J14(5.5,2.2) J15(6.6,2.2) J16(7.7,2.2) K1(-7.7,3.3) K2(-6.6,3.3) K3(-5.5,3.3) K14(5.5,3.3) K15(6.6,3.3) K16(7.7,3.3) L1(-7.7,4.4) L2(-6.6,4.4) L3(-5.45,4.4) L4(-4.4,4.4) L5(-3.3,4.4) L6(-2.2,4.4) L7(-1.1,4.4) L8(0,4.4) L9(1.1,4.4) L10(2.2,4.4) L11(3.3,4.4) L12(4.4,4.4) L14(5.5,4.4) L15(6.6,4.4) L16(7.7,4.4) M1(-7.7,5.5) M2(-6.6,5.5) M3(-5.5,5.5) M4(-4.4,5.5) M5(-3.3,5.5) M6(-2.2,5.5) M7(-1.1,5.5) M8(0,5.5) M9(1.1,5.5) M10(2.2,5.5) M11(3.3,5.5) M12(4.4,5.5) M14(5.5,5.5) M15(6.6,5.5) M16(7.7,5.5) N1(-7.7,6.6) N2(-6.6,6.6) N3(-5.5,6.6) N4(-4.4,6.6) N5(-3.3,6.6) N6(-2.2,6.6) N7(-1.1,6.6) N8(0,6.6) N9(1.1,6.6) N10(2.2,6.6) N11(3.3,6.6) N12(4.4,6.6) N14(5.5,6.6) N15(6.6,6.6) N16(7.7,6.6)
Top Overlay:
  lines w0.127: 8.4,-7.6 -8.7,-7.6 -8.7,7.6 8.4,7.6
  lines w0.128: -8.7,-7.4 cw(c-8.7,-7.6) -8.5,-7.6 ; -8.7,-7.3 cw(c-8.7,-7.6) -8.4,-7.6 ; -8.65,-7.45 -8.55,-7.55
Mechanical 11:
  text ".Designator" at -3.425,-0.775 h1.5
Mechanical 13:
  lines w0.05: -8.4,-6.6 -7.65,-7.3 ; -8.4,-7.3 -8.4,7.3 8.4,7.3 8.4,-7.3 -8.4,-7.3
3D body "IRIS-W1x1.step": height 2.22, standoff 0, extent -8.4,-7.3 8.4,7.3

## IRIS-W1x6 [mm] "IRIS LGA, 152pin ,1.1mm Pitch, 14.6mm x 20.9mm"
height 2.1
pads (152):
  round 0.6 smd: A1(-7.7,-6.6)
  rect 0.6x0.6 smd: A2(-6.6,-6.6) A3(-5.5,-6.6) A4(-4.4,-6.6) A5(-3.3,-6.6) A6(-2.2,-6.6) A7(-1.1,-6.6) A8(0,-6.6) A9(1.1,-6.6) A10(2.2,-6.6) A11(3.3,-6.6) A12(4.4,-6.6) A14(5.5,-6.6) A15(6.6,-6.6) A16(7.7,-6.6) A19(10.7,-6.6) A20(11.8,-6.6) B1(-7.7,-5.5) B2(-6.6,-5.5) B3(-5.5,-5.5) B4(-4.4,-5.5) B5(-3.3,-5.5) B6(-2.2,-5.5) B7(-1.1,-5.5) B8(0,-5.5) B9(1.1,-5.5) B10(2.2,-5.5) B11(3.3,-5.5) B12(4.4,-5.5) B14(5.5,-5.5) B15(6.6,-5.5) B16(7.7,-5.5) B20(11.8,-5.5) C1(-7.7,-4.4) C2(-6.6,-4.4) C3(-5.45,-4.4) C4(-4.4,-4.4) C5(-3.3,-4.4) C6(-2.2,-4.4) C7(-1.1,-4.4) C8(0,-4.4) C9(1.1,-4.4) C10(2.2,-4.4) C11(3.3,-4.4) C12(4.4,-4.4) C14(5.5,-4.4) C15(6.6,-4.4) C16(7.7,-4.4) D1(-7.7,-3.3) D2(-6.6,-3.3) D3(-5.5,-3.3) D14(5.5,-3.3) D15(6.6,-3.3) D16(7.7,-3.3) E1(-7.7,-2.2) E2(-6.6,-2.2) E3(-5.5,-2.2) E14(5.5,-2.2) E15(6.6,-2.2) E16(7.7,-2.2) F1(-7.7,-1.1) F2(-6.6,-1.1) F3(-5.5,-1.1) F5(-3.3,-1.1) F6(-2.2,-1.1) F7(-1.1,-1.1) F8(0,-1.1) F9(1.1,-1.1) F10(2.2,-1.1) F11(3.3,-1.1) F14(5.5,-1.1) F15(6.6,-1.1) F16(7.7,-1.1) G1(-7.7,0) G2(-6.6,0) G3(-5.5,0) G14(5.5,0) G15(6.6,0) G16(7.7,0) H1(-7.7,1.1) H2(-6.6,1.1) H3(-5.5,1.1) H5(-3.3,1.1) H6(-2.2,1.1) H7(-1.1,1.1) H8(0,1.1) H9(1.1,1.1) H10(2.2,1.1) H11(3.3,1.1) H14(5.5,1.1) H15(6.6,1.1) H16(7.7,1.1) J1(-7.7,2.2) J2(-6.6,2.2) J3(-5.5,2.2) J14(5.5,2.2) J15(6.6,2.2) J16(7.7,2.2) K1(-7.7,3.3) K2(-6.6,3.3) K3(-5.5,3.3) K14(5.5,3.3) K15(6.6,3.3) K16(7.7,3.3) L1(-7.7,4.4) L2(-6.6,4.4) L3(-5.45,4.4) L4(-4.4,4.4) L5(-3.3,4.4) L6(-2.2,4.4) L7(-1.1,4.4) L8(0,4.4) L9(1.1,4.4) L10(2.2,4.4) L11(3.3,4.4) L12(4.4,4.4) L14(5.5,4.4) L15(6.6,4.4) L16(7.7,4.4) M1(-7.7,5.5) M2(-6.6,5.5) M3(-5.5,5.5) M4(-4.4,5.5) M5(-3.3,5.5) M6(-2.2,5.5) M7(-1.1,5.5) M8(0,5.5) M9(1.1,5.5) M10(2.2,5.5) M11(3.3,5.5) M12(4.4,5.5) M14(5.5,5.5) M15(6.6,5.5) M16(7.7,5.5) M20(11.8,5.5) N1(-7.7,6.6) N2(-6.6,6.6) N3(-5.5,6.6) N4(-4.4,6.6) N5(-3.3,6.6) N6(-2.2,6.6) N7(-1.1,6.6) N8(0,6.6) N9(1.1,6.6) N10(2.2,6.6) N11(3.3,6.6) N12(4.4,6.6) N14(5.5,6.6) N15(6.6,6.6) N16(7.7,6.6) N19(10.7,6.6) N20(11.8,6.6)
Top Overlay:
  lines w0.127: 12.5,-7.6 -8.7,-7.6 -8.7,7.6 12.5,7.6
  lines w0.128: -8.7,-7.3 cw(c-8.7,-7.6) -8.4,-7.6 ; -8.7,-7.4 cw(c-8.7,-7.6) -8.5,-7.6 -8.7,-7.4
Mechanical 11:
  text ".Designator" at -3.425,-0.775 h1.5
Mechanical 13:
  lines w0.05: -8.4,-6.6 -7.65,-7.3 ; -8.4,-7.3 -8.4,7.3 12.5,7.3 12.5,-7.3 -8.4,-7.3
Multi-Layer:
  pour cut-out: 9,-4.4 12.5,-4.4 12.5,4.4 9,4.4
3D body "IRIS-W1x6(2).step": height 2.22, standoff 0, extent -8.4,-7.3 12.5,7.3

## JODY-W1 [mm] "Host-based modules with Wi-Fi and dual-mode Bluetooth"
height 2.5
pads (75):
  round 0.95 smd: 1(-9.125,-6.125)
  rect 0.7x0.95 smd: 2(-8,-6.125) 3(-7,-6.125) 4(-6,-6.125) 5(-5,-6.125) 6(-4,-6.125) 7(-3,-6.125) 8(-2,-6.125) 9(-1,-6.125) 10(0,-6.125) 12(2,-6.125) 13(3,-6.125) 14(4,-6.125) 15(5,-6.125) 17(7,-6.125) 18(8,-6.125) 32(8,6.125) 33(7,6.125) 34(6,6.125) 35(5,6.125) 36(4,6.125) 37(3,6.125) 38(2,6.125) 39(1,6.125) 40(0,6.125) 41(-1,6.125) 42(-2,6.125) 43(-3,6.125) 44(-4,6.125) 45(-5,6.125) 46(-6,6.125) 47(-7,6.125) 48(-8,6.125)
  rect 0.7x0.95 smd paste+0: 11(1,-6.125) 16(6,-6.125)
  rect 0.95x0.95 smd: 19(9.125,-6.125) 31(9.125,6.125) 49(-9.125,6.125)
  rect 0.95x0.7 smd: 20(9.125,-5) 21(9.125,-4) 22(9.125,-3) 23(9.125,-2) 24(9.125,-1) 25(9.125,0) 26(9.125,1) 27(9.125,2) 28(9.125,3) 29(9.125,4) 30(9.125,5) 50(-9.125,5) 51(-9.125,4) 52(-9.125,3) 53(-9.125,2) 54(-9.125,1) 55(-9.125,0) 56(-9.125,-1) 57(-9.125,-2) 58(-9.125,-3) 59(-9.125,-4) 60(-9.125,-5)
  rect 2.7x2.2 smd paste-10: EP(-6.4,-2.7) EP(-6.4,0) EP(-6.4,2.7) EP(-3.2,-2.7) EP(-3.2,2.7) EP(-3.2,0) EP(0,-2.7) EP(0,0) EP(0,2.7) EP(3.2,-2.7) EP(3.2,0) EP(3.2,2.7) EP(6.4,2.7) EP(6.4,-2.7) EP(6.4,0)
Top Overlay:
  circle w0.254: c-9.2,-7.5 r0.1
  lines w0.15: -9.9,-6.9 9.9,-6.9 9.9,6.9 -9.9,6.9 -9.9,-6.9
Top Paste:
  rectangle: -6.275,1.775 -5.275,2.575
  rectangle: -7.525,1.775 -6.525,2.575
  rectangle: -6.275,2.825 -5.275,3.625
  rectangle: -7.525,2.825 -6.525,3.625
  rectangle: -3.075,1.775 -2.075,2.575
  rectangle: -4.325,1.775 -3.325,2.575
  rectangle: -3.075,2.825 -2.075,3.625
  rectangle: -4.325,2.825 -3.325,3.625
  rectangle: 0.125,1.775 1.125,2.575
  rectangle: -1.125,1.775 -0.125,2.575
  rectangle: 0.125,2.825 1.125,3.625
  rectangle: -1.125,2.825 -0.125,3.625
  rectangle: 3.325,1.775 4.325,2.575
  rectangle: 2.075,1.775 3.075,2.575
  rectangle: 3.325,2.825 4.325,3.625
  rectangle: 2.075,2.825 3.075,3.625
  rectangle: 6.525,1.775 7.525,2.575
  rectangle: 5.275,1.775 6.275,2.575
  rectangle: 6.525,2.825 7.525,3.625
  rectangle: 5.275,2.825 6.275,3.625
  rectangle: 6.525,-0.925 7.525,-0.125
  rectangle: 5.275,-0.925 6.275,-0.125
  rectangle: 6.525,0.125 7.525,0.925
  rectangle: 5.275,0.125 6.275,0.925
  rectangle: 6.525,-3.625 7.525,-2.825
  rectangle: 5.275,-3.625 6.275,-2.825
  rectangle: 6.525,-2.575 7.525,-1.775
  rectangle: 5.275,-2.575 6.275,-1.775
  rectangle: 3.325,-3.625 4.325,-2.825
  rectangle: 2.075,-3.625 3.075,-2.825
  rectangle: 3.325,-2.575 4.325,-1.775
  rectangle: 2.075,-2.575 3.075,-1.775
  rectangle: 3.325,-0.925 4.325,-0.125
  rectangle: 2.075,-0.925 3.075,-0.125
  rectangle: 3.325,0.125 4.325,0.925
  rectangle: 2.075,0.125 3.075,0.925
  rectangle: 0.125,-0.925 1.125,-0.125
  rectangle: -1.125,-0.925 -0.125,-0.125
  rectangle: 0.125,0.125 1.125,0.925
  rectangle: -1.125,0.125 -0.125,0.925
  rectangle: 0.125,-3.625 1.125,-2.825
  rectangle: -1.125,-3.625 -0.125,-2.825
  rectangle: 0.125,-2.575 1.125,-1.775
  rectangle: -1.125,-2.575 -0.125,-1.775
  rectangle: -3.075,-0.925 -2.075,-0.125
  rectangle: -4.325,-0.925 -3.325,-0.125
  rectangle: -3.075,0.125 -2.075,0.925
  rectangle: -4.325,0.125 -3.325,0.925
  rectangle: -3.075,-3.625 -2.075,-2.825
  rectangle: -4.325,-3.625 -3.325,-2.825
  rectangle: -3.075,-2.575 -2.075,-1.775
  rectangle: -4.325,-2.575 -3.325,-1.775
  rectangle: -6.275,-0.925 -5.275,-0.125
  rectangle: -7.525,-0.925 -6.525,-0.125
  rectangle: -6.275,0.125 -5.275,0.925
  rectangle: -7.525,0.125 -6.525,0.925
  rectangle: -6.275,-3.625 -5.275,-2.825
  rectangle: -7.525,-3.625 -6.525,-2.825
  rectangle: -6.275,-2.575 -5.275,-1.775
  rectangle: -7.525,-2.575 -6.525,-1.775
Mechanical 13:
  circle w0.1: c-8.5,-5.5 r0.632
  lines w0.1: -9.9,-6.9 9.9,-6.9 9.9,6.9 -9.9,6.9 -9.9,-6.9
Mechanical 15:
  lines w0.05: -10.1,-7.1 10.1,-7.1 10.1,7.1 -10.1,7.1 -10.1,-7.1
  lines w0.1: -1,0 1,0 ; 0,-1 0,1
  text ".Designator" at 0.1,0.433 h1
3D body "JODY.STEP": height 2.43, standoff 0.02, extent -9.9,-6.9 9.9,6.9